# Altium schematic symbol library STM32C552KET6.SchLib: 1 symbol
Pins are listed as number, name and electrical type; pins without a type are passive.

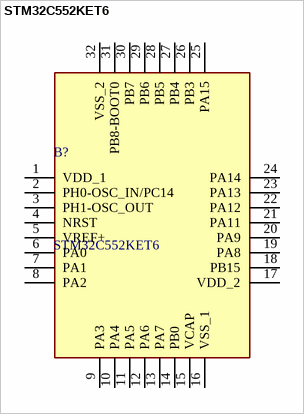
[diagram p0: symbol STM32C552KET6]

## STM32C552KET6
designator B?
Arm? Cortex?-M33 32-bit MCU with FPU, 144 MHz, 593 CoreMark?, up to 512Kbyte dualbank flash memory, 128-Kbyte RAM; Manufacturer_Name: STMicroelectronics; Geometry.Height: 1.6mm; Manufacturer_Part_Number: STM32C552KET6; Mouser Part Number: *; Mouser Price/Stock: *; Arrow Part Number: *; Arrow Price/Stock: *; Datasheet Link: https://www.st.com/resource/en/datasheet/stm32c551cc.pdf
footprint QFP80P900X900X160-32N
footprint QFP80P900X900X160-32N
pins: 1 VDD_1, 2 PH0-OSC_IN/PC14, 3 PH1-OSC_OUT, 4 NRST, 5 VREF+, 6 PA0, 7 PA1, 8 PA2, 9 PA3, 10 PA4, 11 PA5, 12 PA6, 13 PA7, 14 PB0, 15 VCAP, 16 VSS_1, 17 VDD_2, 18 PB15, 19 PA8, 20 PA9, 21 PA11, 22 PA12, 23 PA13, 24 PA14, 25 PA15, 26 PB3, 27 PB4, 28 PB5, 29 PB6, 30 PB7, 31 PB8-BOOT0, 32 VSS_2